# Altium footprint library Antenna$.PcbLib: 34 footprints (part 2 of 3)
Each footprint in its own frame and in the unit in brackets; x right, y up, seen from the top. Pads: shape width x height; smd on the part's side, far side on the other; paste and mask are expansions set on the pad; w line width, h text height; cw(c..) or ccw(c..) is an arc to the next point about the centre after c.
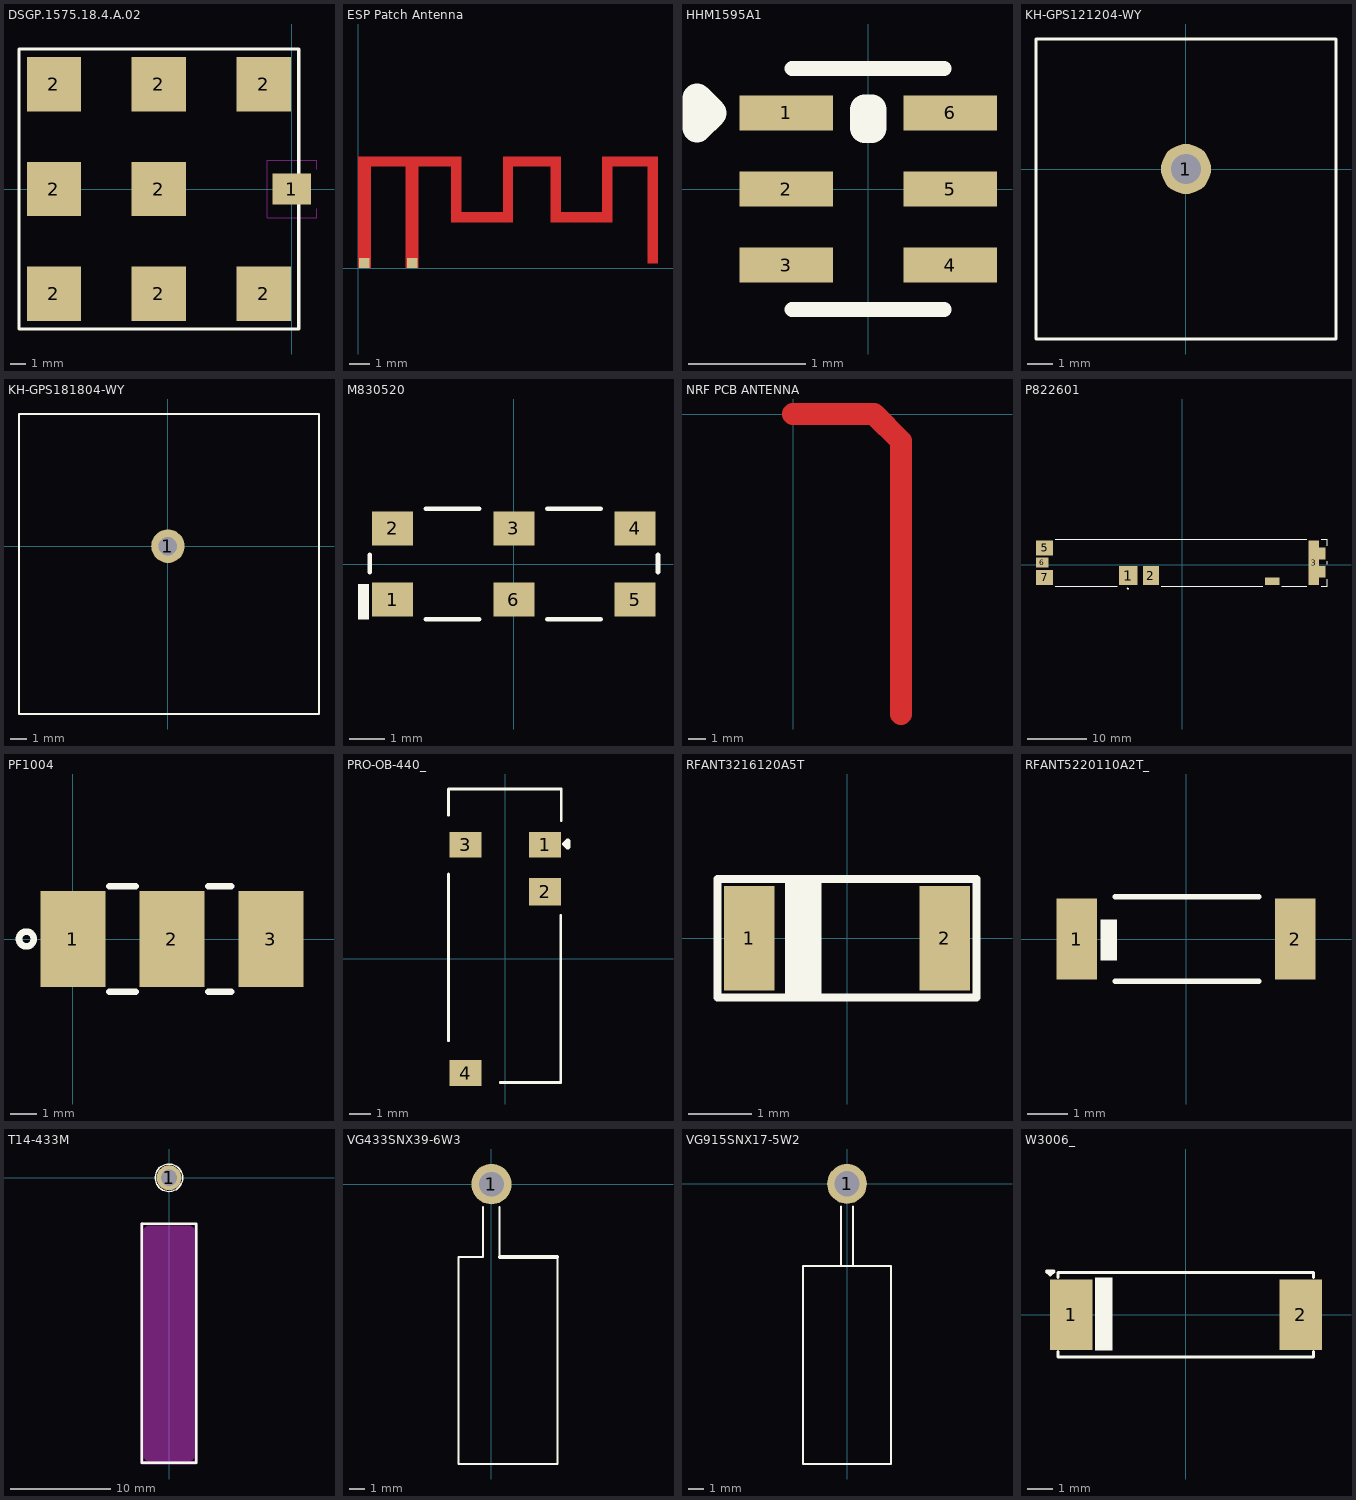
[diagram p1: the footprints below, top view; thin cyan lines are the x and y axes]

## DSGP.1575.18.4.A.02 [mm]
pads (9):
  rect 2.5x2 smd paste-0.25 mask+0.3: 1(0,0)
  rect 3.5x3.5 smd paste-0.6 mask+0.1: 2(-15.3,-6.75) 2(-15.3,0) 2(-15.3,6.75) 2(-8.55,-6.75) 2(-8.55,0) 2(-8.55,6.75) 2(-1.8,-6.75) 2(-1.8,6.75)
Top Overlay:
  lines w0.2: -17.55,-9 -17.55,9 0.45,9 0.45,-9 -17.55,-9
Keep-Out Layer:
  lines w0.01: 1.59,-1.26 1.59,-1.84 -1.59,-1.84 -1.59,1.84 1.59,1.84 1.59,1.26
Multi-Layer:
  pour cut-out: -1.75,-2 1.75,-2 1.75,2 -1.75,2
3D body "SGGP.18A v5.step": height 4.02, standoff 0, extent -17.55,-9 0.46,9

## ESP Patch Antenna [mm]
pads (2):
  rect 0.5x0.5 smd: ANT#(2.616,0.254) GND(0.305,0.254)
Top Layer:
  rectangle: 14,0.24 14.5,5.055
  region: 11.8,5.41 11.8,4.91 14.5,4.91 14.5,5.41
  region: 12.3,5.055 11.8,5.055 11.8,2.21 12.3,2.21
  region: 11.963,2.21 11.963,2.71 9.652,2.71 9.652,2.21
  rectangle: 9.3,2.21 9.8,5.029
  region: 7,5.41 7,4.91 9.8,4.91 9.8,5.41
  region: 7.5,5.029 7,5.029 7,2.21 7.5,2.21
  region: 7.137,2.21 7.137,2.71 4.877,2.71 4.877,2.21
  rectangle: 4.5,2.21 5,5.029
  rectangle: 2.3,0 2.93,5.029
  region: 5,4.91 5,5.41 0,5.41 0,4.91
  rectangle: 0,0 0.63,5.004

## HHM1595A1 [mm]
pads (6):
  rect 0.8x0.3 smd: 1(-0.7,0.65) 2(-0.7,0) 3(-0.7,-0.65) 4(0.7,-0.65) 5(0.7,0) 6(0.7,0.65)
Top Overlay:
  lines w0.127: -0.65,-1.03 0.65,-1.03 ; -0.65,1.03 0.65,1.03
  lines w0.25: -1.462,0.523 -1.335,0.65 -1.462,0.777 -1.462,0.523
  lines w0.254: -0.03,0.52 -0.03,0.68 0.03,0.68 0.03,0.52 -0.03,0.52
3D body "C112665.step": height 0.95, standoff 0, extent -0.625,-1 0.625,1.001

## KH-GPS121204-WY [mm]
pads (1):
  round 2 hole 1.2 paste+0 mask+0.05: 1(0,0)
Top Overlay:
  lines w0.127: -6,-6.8 -6,5.2 6,5.2 6,-6.8 -6,-6.8
3D body "KH-GPS121204-WY-1.STEP": height 4.21, standoff -1.9, extent -6,-6.79 6,5.22

## KH-GPS181804-WY [mm]
pads (1):
  round 2 hole 1.1 paste+0 mask+0.05: 1(0,0)
Top Overlay:
  lines w0.127: -8.89,-10.017 9.017,-10.017 9.017,7.89 -8.89,7.89 -8.89,-10.017
3D body "KH-GPS181804-WY.step": height 4.37, standoff -2, extent -9,-10.067 9,7.943

## M830520 [mm]
pads (6):
  rect 1.15x0.95 smd: 1(-3.4,-1) 2(-3.4,1) 3(0,1) 4(3.4,1) 5(3.4,-1) 6(0,-1)
Top Overlay:
  rectangle: -4.369,-1.549 -4.064,-0.559
  lines w0.127: -4.039,-0.229 -4.039,0.254 ; -2.464,-1.549 -0.965,-1.549 ; -2.464,1.549 -0.965,1.549 ; 0.936,-1.549 2.435,-1.549 ; 0.936,1.549 2.435,1.549 ; 4.039,-0.229 4.039,0.254
3D body "M830520.stp": height 0.65, standoff -0.65, extent -4,-1.5 4,1.5

## NRF PCB ANTENNA [mm]
Top Layer:
  lines w1.27: 0,0 4.689,0 6.248,-1.559 6.248,-17.401

## P822601 [mm]
pads (9):
  rect 3.1x3.15 smd: 1(-9.15,-1.85)
  rect 2.73x3.15 smd: 2(-5.335,-1.85)
  rect 1.8x7.5 smd: 3(22.3,0.325)
  rect 1.1x2 smd: 3_1(23.75,1.875) 3_2(23.75,-1.225)
  rect 2.4x1.2 smd: 4(15.25,-2.825)
  rect 2.9x2.5 smd: 5(-23.35,2.825) 7(-23.35,-2.175)
  rect 2.1x1.7 smd: 6(-23.75,0.325)
Top Overlay:
  lines w0.127: -21.55,-3.675 -11.05,-3.675 ; -21.55,4.325 21.05,4.325 ; -3.6,-3.675 13.65,-3.675 ; 16.85,-3.675 21.05,-3.675 ; 23.55,-3.675 24.55,-3.675 24.55,-2.475 ; 23.55,4.325 24.55,4.325 24.55,3.225 ; 24.55,0.075 24.55,0.575
  lines w0.25: -9.347,-4.115 -9.22,-3.988 -9.093,-4.115 -9.347,-4.115
3D body "P822601--3DModel-STEP-56544.STEP": height 3.52, standoff 0, extent -25.038,-3.721 24.562,4.279

## PF1004 [mm]
pads (3):
  rect 2.5x3.7 smd paste+0 mask+0.051: 1(0,0) 2(3.8,0) 3(7.6,0)
Top Overlay:
  circle w0.254: c-1.788,0 r0.284
  lines w0.254: 1.391,-2.032 2.409,-2.032 ; 1.391,2.032 2.409,2.032 ; 5.191,-2.032 6.086,-2.032 ; 5.191,2.032 6.086,2.032

## PRO-OB-440_ [mm] "RF ANT 2.4GHZ STAMPED MET SLD"
pads (4):
  rect 1.5x1.2 smd: 1(1.865,5.35) 3(-1.865,5.35) 4(-1.865,-5.35)
  rect 1.5x1.28 smd: 2(1.865,3.15)
Top Overlay:
  lines w0.127: -2.667,-3.835 -2.667,3.975 ; -2.667,6.731 -2.667,7.963 2.629,7.963 2.629,6.477 ; -0.241,-5.791 2.603,-5.791 2.603,2.032
  lines w0.25: 2.794,5.385 2.921,5.512 2.921,5.258 2.794,5.385
3D body "PRO-OB-440--3DModel-STEP-1.STEP": height 3.5, standoff -0.03, extent -2.615,-5.744 2.615,8.005

## RFANT3216120A5T [mm]
pads (2):
  rect 0.8x1.66 smd paste+0 mask+0.051: 1(-1.55,0) 2(1.55,0)
Top Overlay:
  rectangle: -0.984,-0.991 -0.406,0.965
  lines w0.127: -2.058,-0.94 -2.058,0.94 2.057,0.94 2.057,-0.94 -2.058,-0.94
3D body "RFANT3216120A5T.step": height 1.2, standoff 0, extent -1.6,-0.8 1.6,0.8

## RFANT5220110A2T_ [mm]
pads (2):
  rect 1x2 smd: 1(-2.7,0) 2(2.7,0)
Top Overlay:
  rectangle: -2.108,-0.533 -1.702,0.483
  lines w0.127: -1.753,-1.041 1.803,-1.041 ; -1.753,1.041 1.803,1.041
3D body "RFANT5220110A2T.stp": height 1.3, standoff 0, extent -2.6,-1 2.6,1

## T14-433M [mm]
pads (1):
  round 2.5 hole 1.6 paste+0 mask+0.051: 1(0,0)
Top Overlay:
  circle w0.127: c0,0 r1.372
  lines w0.254: -2.7,-28.4 -2.7,-4.6 2.7,-4.6 2.7,-4.7 2.7,-28.4 -2.7,-28.4
Keep-Out Layer:
  board cut-out: -2.1,-4.8 2.1,-4.8 2.18,-4.8 2.327,-4.861 2.439,-4.973 2.5,-5.12 2.5,-5.2 2.5,-27.8 2.5,-27.88 2.439,-28.027 2.327,-28.139 2.18,-28.2 2.1,-28.2 -2.1,-28.2 -2.18,-28.2 -2.327,-28.139 -2.439,-28.027 -2.5,-27.88 -2.5,-27.8 -2.5,-5.2 -2.5,-5.12 -2.439,-4.973 -2.327,-4.861 -2.18,-4.8
Top Courtyard:
  region: 2.827,-4.7 2.827,-28.4 2.827,-28.425 2.808,-28.472 2.772,-28.508 2.725,-28.527 2.7,-28.527 -2.7,-28.527 -2.725,-28.527 -2.772,-28.508 -2.808,-28.472 -2.827,-28.425 -2.827,-28.4 -2.827,-4.6 -2.827,-4.547 -2.753,-4.473 -2.647,-4.473 -2.573,-4.547 -2.573,-4.6 -2.573,-28.273 2.573,-28.273 2.573,-4.7 2.573,-4.647 2.647,-4.573 2.753,-4.573 2.827,-4.647
3D body "t14-433m_asm_WO_PCB.stp": height 6.65, standoff -1.2, extent -2.552,-28.2 2.55,0.2

## VG433SNX39-6W3 [mm]
pads (1):
  round 2.6 hole 1.6: 1(0,0)
Top Overlay:
  lines w0.12: -2.108,-18.034 4.242,-18.034
  lines w0.127: -2.108,-18.034 -2.108,-4.699 -0.533,-4.699 -0.533,-1.473 ; 0.533,-4.699 0.533,-1.473 ; 4.242,-18.034 4.242,-4.699
  lines w0.254: 0.533,-4.699 4.242,-4.699
3D body "User Library-SW868-TH13.step": height 7.15, standoff -1.25, extent -2.084,-17.989 4.216,0.311

## VG915SNX17-5W2 [mm]
pads (1):
  round 2.5 hole 1.6: 1(0,0)
Top Overlay:
  lines w0.127: -0.381,-5.172 -0.381,-1.997 -0.381,-1.431 ; 0.381,-5.172 0.381,-1.997 0.381,-1.431 ; -2.75,-17.6 2.75,-17.6 2.75,-5.172 -2.75,-5.172 -2.75,-17.6
3D body "C718842.step": height 4.85, standoff -0.9, extent -2.749,-17.548 2.751,0.448

## W3006_ [mm]
pads (2):
  rect 1.7x2.8 smd: 1(-4.55,0) 2(4.55,0)
Top Overlay:
  rectangle: -3.607,-1.422 -2.921,1.473
  lines w0.127: -5.08,-1.473 -5.08,-1.676 5.055,-1.676 5.055,-1.473 ; -5.08,1.473 -5.08,1.676 5.055,1.676 5.055,1.473 ; -5.537,1.727 -5.232,1.727 -5.385,1.575 -5.537,1.727
3D body "W3006.STEP": height 1.6, standoff 0, extent -5.05,-1.6 5.05,1.6